# Altium footprint library V275LA40A.PcbLib: 1 footprints
Each footprint in its own frame and in the unit in brackets; x right, y up, seen from the top. Pads: shape width x height; smd on the part's side, far side on the other; paste and mask are expansions set on the pad; w line width, h text height; cw(c..) or ccw(c..) is an arc to the next point about the centre after c.
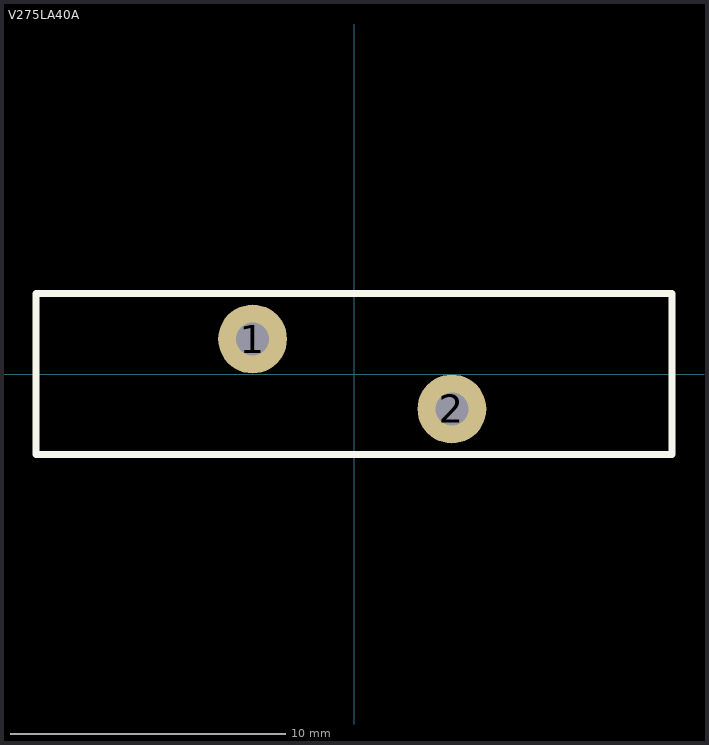
[diagram p0: the footprint, top view; thin cyan lines are the x and y axes]

## V275LA40A [mm] "Metal Oxide Varistor"
pads (2):
  round 2.5 hole 1.2: 1(-3.683,1.27) 2(3.556,-1.27)
Top Overlay:
  lines w0.254: -11.557,-2.921 11.557,-2.921 11.557,2.921 -11.557,2.921 -11.557,-2.921
3D body "V275LA40AP.stp": height 31.9, standoff -20, extent -11.499,-2.8 11.499,2.8